# Altium schematic symbol library WM8978.SchLib: 16 symbols
Pins are listed as number, name and electrical type; pins without a type are passive.

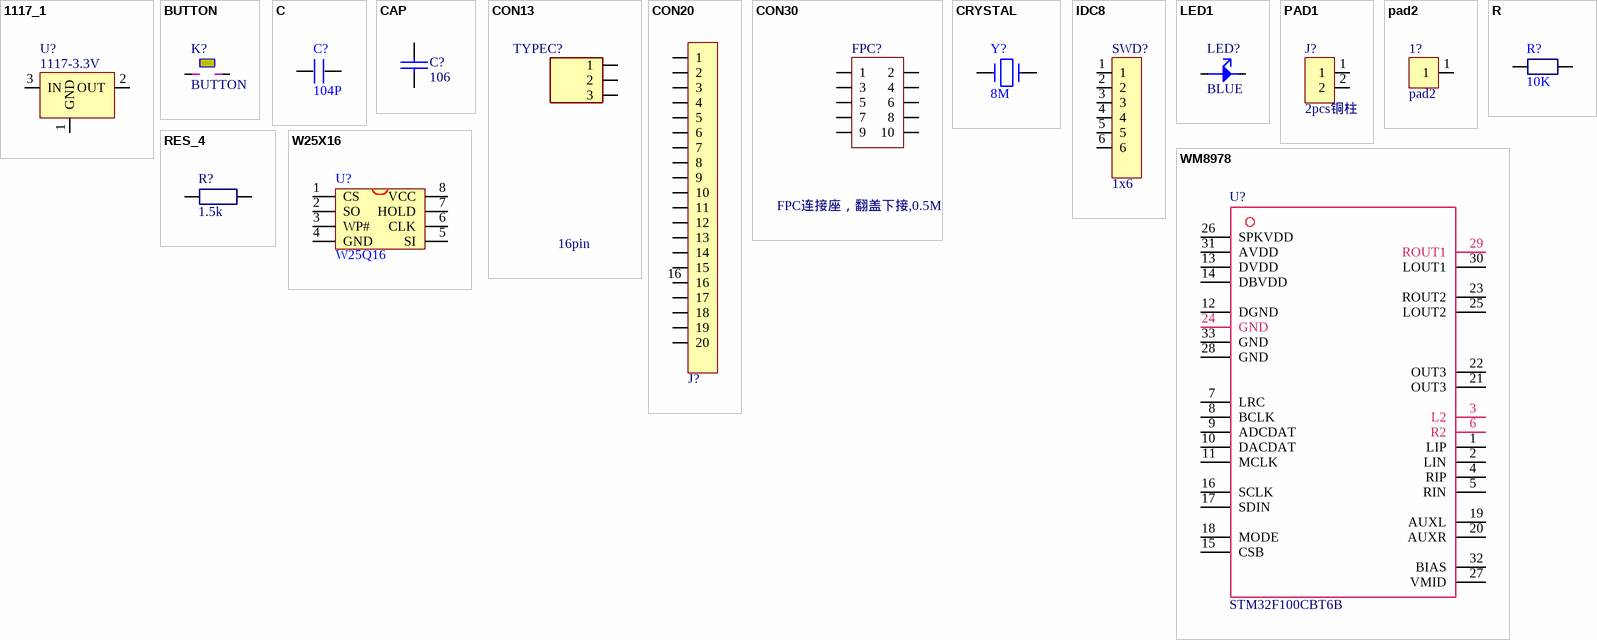
[diagram p0: symbols 1117_1 to WM8978]

## 1117_1
designator U?, comment 1117-3.3V
footprint SOT89-150P409X160-3L (SOT89, 3-Leads, Body 4.50x2.50mm, Pitch 1.50mm, Lead Span 4.1mm, IPC High Density)
pins: 1 GND, 2 OUT, 3 IN

## BUTTON
designator K?
footprint 3.3*3.3*2.0MM - 2 (多加两个固定焊盘)
pins: 1, 2
2 alternate drawings of the same symbol

## C
designator C?, comment 104P
footprint 0603P
footprint 0805
footprint CC5.08
footprint CC4.572
footprint C0603
pins: 1, 2
2 alternate drawings of the same symbol

## CAP
designator C?, comment 106
Capacitor
footprint CAPC3216X16M (Chip Capacitor, 2-Leads, Body 3.20x1.60mm, IPC Low Density)
pins: 1, 2

## CON13
designator TYPEC?, comment 16pin
footprint TYPE-C-31-M-12 (USB TypeC座子，韩国韩荣)
pins: 1, 2, 3

## CON20
designator J?, comment 1X20  (value not drawn)
Connector
footprint PZ2.54-1X20P
pins: 1, 2, 3, 4, 5, 6, 7, 8, 9, 10, 11, 12, 13, 14, 15, 16, 17, 18, 19, 20

## CON30
designator FPC?, comment FPC连接座，翻盖下接,0.5MM间距
footprint FPC10P-0.5MM
pins: 1, 2, 3, 4, 5, 6, 7, 8, 9, 10

## CRYSTAL
designator Y?, comment 8M
Crystal
footprint XTAL3225
pins: 1, 2

## IDC8
designator SWD?, comment 1x6
footprint 6P
pins: 1, 2, 3, 4, 5, 6

## LED1
designator LED?, comment BLUE
footprint LED0603
pins: 1, 2
2 alternate drawings of the same symbol

## PAD1
designator J?, comment 2pcs铜柱
footprint PAD-2MM
pins: 1, 2

## pad2
designator 1?
footprint PAD-1
pins: 1

## R
designator R?, comment 10K
footprint 0603
footprint R0603
pins: 1, 2
2 alternate drawings of the same symbol

## RES_4
designator R?, comment 1.5k
footprint R0603
footprint R0805
footprint FUSE3216X08M (Chip Fuse, 2-Leads, Body 3.20x1.60mm, IPC Low Density)
pins: 1, 2
2 alternate drawings of the same symbol

## W25X16
designator U?, comment W25Q16
W25X16;SST25VF016;MX25L1605
footprint SOIC-8
footprint SOP127P790X216-8N (SOP, 8-Leads, Body 5.28x5.28mm, Pitch 1.27mm, IPC Medium Density)
pins: 1 CS, 2 SO, 3 WP#, 4 GND, 5 SI, 6 CLK, 7 HOLD, 8 VCC
2 alternate drawings of the same symbol

## WM8978
designator U?, comment STM32F100CBT6B
footprint TSQFP50P900X900X160-48N (TSQFP, 48-Leads, Body 7.00x7.00mm, Pitch 0.50mm, IPC Medium Density)
pins: 1 LIP, 2 LIN, 3 L2, 4 RIP, 5 RIN, 6 R2, 7 LRC, 8 BCLK, 9 ADCDAT, 10 DACDAT, 11 MCLK, 12 DGND, 13 DVDD, 14 DBVDD, 15 CSB, 16 SCLK, 17 SDIN, 18 MODE, 19 AUXL, 20 AUXR, 21 OUT3, 22 OUT3, 23 ROUT2, 24 GND, 25 LOUT2, 26 SPKVDD, 27 VMID, 28 GND, 29 ROUT1, 30 LOUT1, 31 AVDD, 32 BIAS, 33 GND